# Altium footprint library Package_DFN_QFN.PcbLib: 735 footprints (part 29 of 46)
Each footprint in its own frame and in the unit in brackets; x right, y up, seen from the top. Pads: shape width x height; smd on the part's side, far side on the other; paste and mask are expansions set on the pad; w line width, h text height; cw(c..) or ccw(c..) is an arc to the next point about the centre after c.
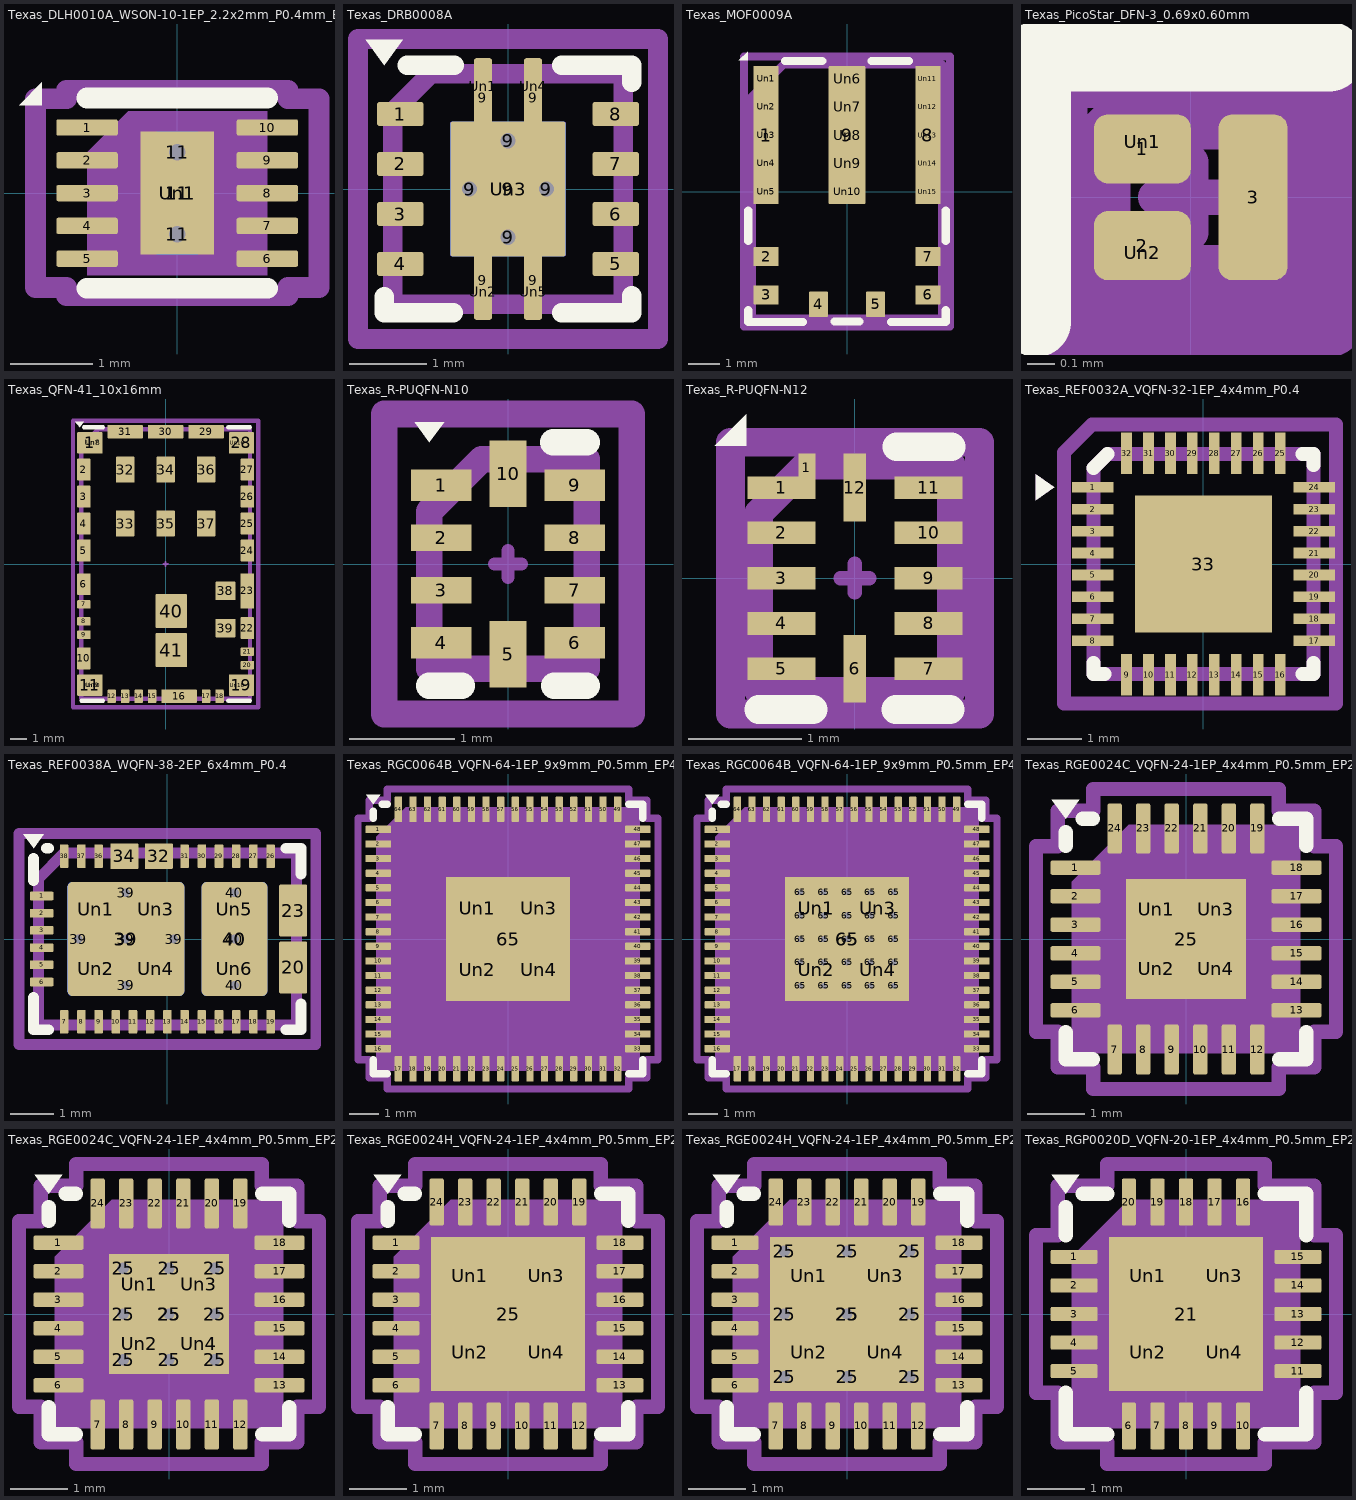
[diagram p28: the footprints below, top view; thin cyan lines are the x and y axes]

## Texas_DLH0010A_WSON-10-1EP_2.2x2mm_P0.4mm_EP0.9x1.5mm_ThermalVias [mm] "Texas_DLH0010A_WSON-10-1EP_2.2x2mm_P0.4mm_EP0.9x1.5mm_ThermalVias"
pads (15):
  rrect25% 0.75x0.2 smd: 1(-1.1,0.8) 2(-1.1,0.4) 3(-1.1,0) 4(-1.1,-0.4) 5(-1.1,-0.8) 6(1.1,-0.8) 7(1.1,-0.4) 8(1.1,0) 9(1.1,0.4) 10(1.1,0.8)
  round 0.5 hole 0.2: 11(0,-0.5) 11(0,0.5)
  rect 0.9x1.5 smd: 11(0,0)
  rect 0.5x1.5 smd far side: 11(0,0)
  rrect25% 0.84x1.41 on Top Paste: Un1(0,0)
F.SilkS:
  region: -1.65,1.07 -1.93,1.07 -1.65,1.35
  lines w0.254: -1.1,-1.16 1.1,-1.16 ; -1.1,1.16 1.1,1.16
Top Component Center:
  lines w0.127: -0.127,0 0.127,0 -0.127,0 ; 0,-0.127 0,0.127 0,-0.127
Top Assembly:
  region: 1.1,-1 -1.1,-1 -1.1,0.5 -0.6,1 1.1,1
Top Courtyard:
  lines w0.254: -1.73,-1.15 -1.73,1.15 -1.35,1.15 -1.35,1.25 1.35,1.25 1.35,1.15 1.73,1.15 1.73,-1.15 1.35,-1.15 1.35,-1.25 -1.35,-1.25 -1.35,-1.15 -1.73,-1.15
Top Designator:
  text ".Designator" at -3.43,-0.344 h1.52
3D body "Texas_DLH0010A_WSON-10-1EP_2.2x2mm_P0.4mm_EP0.9x1.5mm.step": height 0.8, standoff 0, extent -1.1,-0.988 1.1,0.988

## Texas_DRB0008A [mm] "Texas_DRB0008A"
pads (23):
  rrect16% 0.6x0.31 smd: 1(-1.4,0.975) 2(-1.4,0.325) 3(-1.4,-0.325) 4(-1.4,-0.975) 5(1.4,-0.975) 6(1.4,-0.325) 7(1.4,0.325) 8(1.4,0.975)
  round 0.5 hole 0.2: 9(-0.5,0) 9(0,-0.625) 9(0,0.625) 9(0.5,0)
  rrect22% 0.23x1.025 smd: 9(-0.325,-1.188) 9(-0.325,1.188) 9(0.325,-1.188) 9(0.325,1.188)
  rrect3% 1.5x1.75 smd: 9(0,0)
  rrect3% 1.5x1.75 smd far side: 9(0,0)
  rrect22% 0.23x0.725 on Top Paste: Un1(-0.325,1.337) Un2(-0.325,-1.337) Un4(0.325,1.337) Un5(0.325,-1.337)
  rrect4% 1.34x1.55 on Top Paste: Un3(0,0)
F.SilkS:
  region: -1.61,1.61 -1.85,1.94 -1.37,1.94
  lines w0.254: -1.61,-1.4 -1.61,-1.61 -0.71,-1.61 ; -1.31,1.61 -0.7,1.61 ; 0.7,-1.61 1.61,-1.61 1.61,-1.39 ; 0.7,1.61 1.61,1.61 1.61,1.39
Top Component Center:
  lines w0.127: -0.127,0 0.127,0 -0.127,0 ; 0,-0.127 0,0.127 0,-0.127
Top Assembly:
  lines w0.254: -1.5,-1.5 1.5,-1.5 1.5,1.5 -1,1.5 -1.5,1 -1.5,-1.5
Top Courtyard:
  lines w0.254: -1.95,-1.95 1.95,-1.95 1.95,1.95 -1.95,1.95 -1.95,-1.95
Top Designator:
  text ".Designator" at -3.43,-0.344 h1.52

## Texas_MOF0009A [mm] "Texas_MOF0009A"
pads (24):
  rrect6% 0.8x4.35 smd: 1(-2.55,1.777) 8(2.55,1.777)
  rrect8% 0.8x0.6 smd: 2(-2.55,-2.053) 3(-2.55,-3.253) 6(2.55,-3.253) 7(2.55,-2.053)
  rrect8% 0.6x0.8 smd: 4(-0.9,-3.552) 5(0.9,-3.552)
  rrect4% 1.15x4.35 smd: 9(0,1.777)
  rrect8% 0.7x0.59 on Top Paste: Un1(-2.55,3.558) Un2(-2.55,2.668) Un3(-2.55,1.777) Un4(-2.55,0.887) Un5(-2.55,-0.002) Un11(2.55,3.558) Un12(2.55,2.668) Un13(2.55,1.777) Un14(2.55,0.887) Un15(2.55,-0.002)
  rrect8% 1.05x0.59 on Top Paste: Un6(0,3.558) Un7(0,2.668) Un8(0,1.777) Un9(0,0.887) Un10(0,-0.002)
F.SilkS:
  region: -3.13,4.13 -3.41,4.13 -3.13,4.41
  lines w0.254: -3.11,-3.74 -3.11,-4.11 -1.392,-4.11 ; -3.11,-1.56 -3.11,-0.593 ; -1.955,4.11 -0.78,4.11 ; -0.4,-4.1 0.4,-4.1 ; 0.775,4.11 1.95,4.11 ; 1.392,-4.11 3.11,-4.11 3.11,-3.74 ; 3.11,-1.56 3.11,-0.593
Top Component Center:
  lines w0.127: -0.127,0 0.127,0 -0.127,0 ; 0,-0.127 0,0.127 0,-0.127
Top Assembly:
  lines w0.254: -3,-4 3,-4 3,4 -2,4 -3,3 -3,-4
Top Courtyard:
  lines w0.254: -3.25,-4.25 3.25,-4.25 3.25,4.25 -3.25,4.25 -3.25,-4.25
Top Designator:
  text ".Designator" at -3.43,-0.344 h1.52

## Texas_PicoStar_DFN-3_0.69x0.60mm [mm] "Texas_PicoStar_DFN-3_0.69x0.60mm"
pads (5):
  rrect40% 0.35x0.25 smd: 1(-0.175,0.175) 2(-0.175,-0.175)
  rrect40% 0.25x0.6 smd: 3(0.225,0)
  rrect25% 0.25x0.2 on Top Paste: Un1(-0.175,0.2) Un2(-0.175,-0.2)
F.SilkS:
  lines w0.254: -0.56,-0.45 -0.56,0.51 0.5,0.51
Top Component Center:
  lines w0.127: -0.127,0 0.127,0 -0.127,0 ; 0,-0.127 0,0.127 0,-0.127
Top Assembly:
  lines w0.254: -0.345,-0.3 0.345,-0.3 0.345,0.3 -0.195,0.3 -0.345,0.15 -0.345,-0.3
Top Courtyard:
  lines w0.254: -0.5,-0.45 0.5,-0.45 0.5,0.45 -0.5,0.45 -0.5,-0.45
Top Designator:
  text ".Designator" at -1.69,-0.17 h0.75
3D body "Texas_PicoStar_DFN-3_0.69x0.60mm.step": height 0.36, standoff 0, extent -0.345,-0.3 0.345,0.3

## Texas_QFN-41_10x16mm [mm] "Texas_QFN-41_10x16mm"
pads (65):
  rrect8% 1.5x1.27 smd: 1(-4.5,7.185) 11(-4.5,-7.185) 19(4.5,-7.185) 28(4.5,7.185)
  rrect12% 0.8x1.3 smd: 2(-4.85,5.6) 3(-4.85,4) 4(-4.85,2.4) 5(-4.85,0.8) 6(-4.85,-1.2) 10(-4.85,-5.6) 22(4.85,-3.8) 24(4.85,0.8) 25(4.85,2.4) 26(4.85,4) 27(4.85,5.6)
  rrect20% 0.8x0.5 smd: 7(-4.85,-2.4) 8(-4.85,-3.4) 9(-4.85,-4.2) 20(4.85,-6) 21(4.85,-5.2)
  rrect20% 0.5x0.8 smd: 12(-3.2,-7.85) 13(-2.4,-7.85) 14(-1.6,-7.85) 15(-0.8,-7.85) 17(2.4,-7.85) 18(3.2,-7.85)
  rrect12% 2.1x0.8 smd: 16(0.8,-7.85) 29(2.4,7.85) 30(0,7.85) 31(-2.4,7.85)
  rrect12% 0.8x2.1 smd: 23(4.85,-1.6)
  rrect9% 1.1x1.54 smd: 32(-2.4,5.6) 33(-2.4,2.4) 34(0,5.6) 35(0,2.4) 36(2.4,5.6) 37(2.4,2.4)
  rrect9% 1.2x1.1 smd: 38(3.55,-1.6) 39(3.55,-3.8)
  rrect5% 1.85x2.02 smd: 40(0.335,-2.79) 41(0.335,-5.11)
  rect 0.27x0.6 on Top Solder: Un1(-4.635,5.6) Un2(-4.635,4) Un3(-4.635,2.4) Un4(-4.635,0.8) Un5(-4.635,-1.2) Un6(-4.635,-5.6) Un19(4.635,5.6) Un20(4.635,4) Un21(4.635,2.4) Un22(4.635,0.8) Un24(4.635,-3.8)
  rect 0.87x0.87 on Top Paste: Un7(-4.285,7.185) Un9(-4.285,-7.185) Un15(4.285,7.185) Un17(4.285,-7.185)
  rect 0.87x1.07 on Top Solder: Un8(-4.285,7.185) Un10(-4.285,-7.185) Un16(4.285,7.185) Un18(4.285,-7.185)
  rect 1.6x0.27 on Top Solder: Un11(-2.4,7.635) Un12(0,7.635) Un13(0.8,-7.635) Un14(2.4,7.635)
  rect 0.27x1.6 on Top Solder: Un23(4.635,-1.6)
F.SilkS:
  region: -5.11,8.11 -5.35,8.44 -4.87,8.44
  lines w0.254: -4.99,-8.11 -3.71,-8.11 ; -4.84,8.11 -3.72,8.11 ; 3.71,8.11 5,8.11 ; 3.72,-8.11 5,-8.11
F.Paste:
  drawing of 41 lines, arcs and shapes, not listed
F.Mask:
  drawing of 41 lines, arcs and shapes, not listed
Top Component Center:
  lines w0.127: -0.127,0 0.127,0 -0.127,0 ; 0,-0.127 0,0.127 0,-0.127
Top Assembly:
  lines w0.254: -5,-8 5,-8 5,8 -4,8 -5,7 -5,-8
Top Courtyard:
  lines w0.254: -5.5,-8.5 5.5,-8.5 5.5,8.5 -5.5,8.5 -5.5,-8.5
Top Designator:
  text ".Designator" at -3.43,-0.344 h1.52

## Texas_R-PUQFN-N10 [mm] "Texas_R-PUQFN-N10"
pads (10):
  rect 0.575x0.3 smd: 1(-0.637,0.75) 4(-0.637,-0.75) 6(0.637,-0.75) 9(0.637,0.75)
  rect 0.575x0.25 smd: 2(-0.637,0.25) 3(-0.637,-0.25) 7(0.637,-0.25) 8(0.637,0.25)
  rect 0.35x0.63 smd: 5(0,-0.86) 10(0,0.86)
F.SilkS:
  region: -0.75,1.16 -0.89,1.35 -0.61,1.35
  lines w0.254: -0.75,-1.16 -0.44,-1.16 ; 0.43,1.16 0.75,1.16 ; 0.44,-1.16 0.75,-1.16
Top Component Center:
  lines w0.127: -0.127,0 0.127,0 -0.127,0 ; 0,-0.127 0,0.127 0,-0.127
Top Assembly:
  lines w0.254: -0.75,-1 -0.75,0.5 -0.25,1 0.75,1 0.75,-1 -0.75,-1
Top Courtyard:
  lines w0.254: -1.18,-1.43 -1.18,1.43 1.18,1.43 1.18,-1.43 -1.18,-1.43
Top Designator:
  text ".Designator" at -1.575,-0.158 h0.7

## Texas_R-PUQFN-N12 [mm] "Texas_R-PUQFN-N12"
pads (13):
  rect 0.6x0.2 smd: 1(-0.65,0.8) 2(-0.65,0.4) 3(-0.65,0) 4(-0.65,-0.4) 5(-0.65,-0.8) 7(0.65,-0.8) 8(0.65,-0.4) 9(0.65,0) 10(0.65,0.4) 11(0.65,0.8)
  rect 0.15x0.25 smd: 1(-0.425,0.975)
  rect 0.2x0.6 smd: 6(0,-0.8) 12(0,0.8)
F.SilkS:
  region: -0.96,1.17 -1.24,1.17 -0.96,1.45
  lines w0.254: -0.85,-1.16 -0.37,-1.16 ; 0.36,-1.16 0.84,-1.16 ; 0.37,1.16 0.85,1.16
Top Component Center:
  lines w0.127: -0.127,0 0.127,0 -0.127,0 ; 0,-0.127 0,0.127 0,-0.127
Top Assembly:
  lines w0.254: -0.85,-1 0.85,-1 0.85,1 -0.425,1 -0.85,0.575 -0.85,-1
Top Courtyard:
  lines w0.254: -1.1,-1.2 1.1,-1.2 1.1,1.2 -1.1,1.2 -1.1,-1.2
Top Designator:
  text ".Designator" at -1.575,-0.158 h0.7
3D body "Texas_R-PUQFN-N12.step": height 0.53, standoff 0, extent -0.85,-1 0.85,1

## Texas_REF0032A_VQFN-32-1EP_4x4mm_P0.4 [mm] "Texas_REF0038A_WQFN-38-2EP_6x4mm_P0.4"
pads (33):
  rect 0.75x0.192 smd: 1(-2.016,1.4) 2(-2.016,1) 3(-2.016,0.6) 4(-2.016,0.2) 5(-2.016,-0.2) 6(-2.016,-0.6) 7(-2.016,-1) 8(-2.016,-1.4) 17(2.016,-1.4) 18(2.016,-1) 19(2.016,-0.6) 20(2.016,-0.2) 21(2.016,0.2) 22(2.016,0.6) 23(2.016,1) 24(2.016,1.4)
  rect 0.192x0.75 smd: 9(-1.4,-2.016) 10(-1,-2.016) 11(-0.6,-2.016) 12(-0.2,-2.016) 13(0.2,-2.016) 14(0.6,-2.016) 15(1,-2.016) 16(1.4,-2.016) 25(1.4,2.016) 26(1,2.016) 27(0.6,2.016) 28(0.2,2.016) 29(-0.2,2.016) 30(-0.6,2.016) 31(-1,2.016) 32(-1.4,2.016)
  rect 2.5x2.5 smd: 33(0,0)
F.SilkS:
  region: -2.718,1.397 -3.048,1.157 -3.048,1.637
  lines w0.254: -2,-1.8 -2,-2 -1.8,-2 ; -2,1.75 -1.75,2 ; 1.8,-2 2,-2 2,-1.8 ; 1.8,2 2,2 2,1.8
F.Paste:
  region: 0.901,-0.901 -0.901,-0.901 -0.901,0.901 0.901,0.901
Top Assembly:
  region: -2.718,1.397 -3.048,1.157 -3.048,1.637
  lines w0.254: -2,-2 2,-2 2,2 -1.75,2 -2,1.75 -2,-2
  text "'.Designator'" at -4.047,-0.84 h1
Top Courtyard:
  lines w0.254: -2.54,-2.54 2.413,-2.54 2.413,2.54 -2.032,2.54 -2.54,2.032 -2.54,-2.54
3D body "Texas_REF0032A_VQFN-32-1EP_4x4mm_P0.4.stp": height 1, standoff 0, extent -2,-2 2,2

## Texas_REF0038A_WQFN-38-2EP_6x4mm_P0.4 [mm] "Texas_REF0038A_WQFN-38-2EP_6x4mm_P0.4"
pads (50):
  rrect25% 0.55x0.2 smd: 1(-2.925,1) 2(-2.925,0.6) 3(-2.925,0.2) 4(-2.925,-0.2) 5(-2.925,-0.6) 6(-2.925,-1)
  rrect25% 0.2x0.55 smd: 7(-2.4,-1.925) 8(-2,-1.925) 9(-1.6,-1.925) 10(-1.2,-1.925) 11(-0.8,-1.925) 12(-0.4,-1.925) 13(0,-1.925) 14(0.4,-1.925) 15(0.8,-1.925) 16(1.2,-1.925) 17(1.6,-1.925) 18(2,-1.925) 19(2.4,-1.925) 26(2.4,1.925) 27(2,1.925) 28(1.6,1.925) 29(1.2,1.925) 30(0.8,1.925) 31(0.4,1.925) 36(-1.6,1.925) 37(-2,1.925) 38(-2.4,1.925)
  rrect8% 0.65x1.2 smd: 20(2.925,-0.663) 23(2.925,0.663)
  rrect8% 0.65x0.6 smd: 32(-0.2,1.925) 34(-1,1.925)
  round 0.5 hole 0.2: 39(-2.075,0) 39(-0.965,-1.075) 39(-0.965,0) 39(-0.965,1.075) 39(0.145,0) 40(1.56,-1.075) 40(1.56,0) 40(1.56,1.075)
  rrect9% 2.72x2.65 smd: 39(-0.965,0)
  rrect9% 2.72x2.65 smd far side: 39(-0.965,0)
  rrect16% 1.53x2.65 smd: 40(1.56,0)
  rrect16% 1.53x2.65 smd far side: 40(1.56,0)
  rrect21% 1.17x1.17 on Top Paste: Un1(-1.66,0.69) Un3(-0.27,0.69)
  rrect21% 1.19x1.17 on Top Paste: Un2(-1.66,-0.69) Un4(-0.27,-0.69)
  rrect21% 1.4x1.17 on Top Paste: Un5(1.56,0.69) Un6(1.56,-0.69)
F.SilkS:
  region: -3.11,2.11 -3.35,2.44 -2.87,2.44
  lines w0.254: -3.11,-1.36 -3.11,-2.11 -2.76,-2.11 ; -3.11,1.36 -3.11,1.87 ; -2.81,2.11 -2.76,2.11 ; 2.76,-2.11 3.11,-2.11 3.11,-1.51 ; 2.76,2.11 3.11,2.11 3.11,1.51
F.Paste:
  region: -0.75,1.7 -1.25,1.7 -1.25,2.15 -1.15,2.15 -1.15,1.8 -0.85,1.8 -0.85,2.15 -0.75,2.15
  region: 0.05,1.7 -0.45,1.7 -0.45,2.15 -0.35,2.15 -0.35,1.8 -0.05,1.8 -0.05,2.15 0.05,2.15
  region: 3.15,1.062 2.8,1.062 2.8,0.713 3.15,0.713 3.15,0.613 2.8,0.613 2.8,0.262 3.15,0.262 3.15,0.162 2.7,0.162 2.7,1.162 3.15,1.162
  region: 3.15,-0.262 2.8,-0.262 2.8,-0.613 3.15,-0.613 3.15,-0.713 2.8,-0.713 2.8,-1.062 3.15,-1.062 3.15,-1.162 2.7,-1.162 2.7,-0.162 3.15,-0.162
F.Mask:
  region: -0.75,1.7 -1.25,1.7 -1.25,2.15 -1.15,2.15 -1.15,1.8 -0.85,1.8 -0.85,2.15 -0.75,2.15
  region: 0.05,1.7 -0.45,1.7 -0.45,2.15 -0.35,2.15 -0.35,1.8 -0.05,1.8 -0.05,2.15 0.05,2.15
  region: 3.15,1.062 2.8,1.062 2.8,0.713 3.15,0.713 3.15,0.613 2.8,0.613 2.8,0.262 3.15,0.262 3.15,0.162 2.7,0.162 2.7,1.162 3.15,1.162
  region: 3.15,-0.262 2.8,-0.262 2.8,-0.613 3.15,-0.613 3.15,-0.713 2.8,-0.713 2.8,-1.062 3.15,-1.062 3.15,-1.162 2.7,-1.162 2.7,-0.162 3.15,-0.162
Top Component Center:
  lines w0.127: -0.127,0 0.127,0 -0.127,0 ; 0,-0.127 0,0.127 0,-0.127
Top Assembly:
  lines w0.254: -3,-2 -3,1.4 -2.4,2 3,2 3,-2 -3,-2
Top Courtyard:
  lines w0.254: -3.45,-2.45 -3.45,2.45 3.45,2.45 3.45,-2.45 -3.45,-2.45
Top Designator:
  text ".Designator" at -3.43,-0.344 h1.52
3D body "Texas_REF0038A_WQFN-38-2EP_6x4mm_P0.4.stp": height 0.8, standoff 0, extent -2.996,-1.988 3.004,2.012

## Texas_RGC0064B_VQFN-64-1EP_9x9mm_P0.5mm_EP4.25x4.25mm [mm] "Texas_RGC0064B_VQFN-64-1EP_9x9mm_P0.5mm_EP4.25x4.25mm"
pads (69):
  rrect25% 0.875x0.25 smd: 1(-4.437,3.75) 2(-4.437,3.25) 3(-4.437,2.75) 4(-4.437,2.25) 5(-4.437,1.75) 6(-4.437,1.25) 7(-4.437,0.75) 8(-4.437,0.25) 9(-4.437,-0.25) 10(-4.437,-0.75) 11(-4.437,-1.25) 12(-4.437,-1.75) 13(-4.437,-2.25) 14(-4.437,-2.75) 15(-4.437,-3.25) 16(-4.437,-3.75) 33(4.437,-3.75) 34(4.437,-3.25) 35(4.437,-2.75) 36(4.437,-2.25) 37(4.437,-1.75) 38(4.437,-1.25) 39(4.437,-0.75) 40(4.437,-0.25) 41(4.437,0.25) 42(4.437,0.75) 43(4.437,1.25) 44(4.437,1.75) 45(4.437,2.25) 46(4.437,2.75) 47(4.437,3.25) 48(4.437,3.75)
  rrect25% 0.25x0.875 smd: 17(-3.75,-4.437) 18(-3.25,-4.437) 19(-2.75,-4.437) 20(-2.25,-4.437) 21(-1.75,-4.437) 22(-1.25,-4.437) 23(-0.75,-4.437) 24(-0.25,-4.437) 25(0.25,-4.437) 26(0.75,-4.437) 27(1.25,-4.437) 28(1.75,-4.437) 29(2.25,-4.437) 30(2.75,-4.437) 31(3.25,-4.437) 32(3.75,-4.437) 49(3.75,4.437) 50(3.25,4.437) 51(2.75,4.437) 52(2.25,4.437) 53(1.75,4.437) 54(1.25,4.437) 55(0.75,4.437) 56(0.25,4.437) 57(-0.25,4.437) 58(-0.75,4.437) 59(-1.25,4.437) 60(-1.75,4.437) 61(-2.25,4.437) 62(-2.75,4.437) 63(-3.25,4.437) 64(-3.75,4.437)
  rect 4.25x4.25 smd: 65(0,0)
  rrect15% 1.71x1.71 on Top Paste: Un1(-1.06,1.06) Un2(-1.06,-1.06) Un3(1.06,1.06) Un4(1.06,-1.06)
F.SilkS:
  region: -4.61,4.61 -4.85,4.94 -4.37,4.94
  lines w0.254: -4.61,-4.135 -4.61,-4.61 -4.135,-4.61 ; -4.61,4.135 -4.61,4.37 ; -4.31,4.61 -4.135,4.61 ; 4.135,-4.61 4.61,-4.61 4.61,-4.135 ; 4.135,4.61 4.61,4.61 4.61,4.135
Top Component Center:
  lines w0.127: -0.127,0 0.127,0 -0.127,0 ; 0,-0.127 0,0.127 0,-0.127
Top Assembly:
  region: 4.5,-4.5 -4.5,-4.5 -4.5,3.5 -3.5,4.5 4.5,4.5
Top Courtyard:
  lines w0.254: -5.13,-4.13 -4.75,-4.13 -4.75,-4.75 -4.13,-4.75 -4.13,-5.13 4.13,-5.13 4.13,-4.75 4.75,-4.75 4.75,-4.13 5.13,-4.13 5.13,4.13 4.75,4.13 4.75,4.75 4.13,4.75 4.13,5.13 -4.13,5.13 -4.13,4.75 -4.75,4.75 -4.75,4.13 -5.13,4.13 -5.13,-4.13
Top Designator:
  text ".Designator" at -3.43,-0.344 h1.52
3D body "Texas_RGC0064B_VQFN-64-1EP_9x9mm_P0.5mm_EP4.25x4.25mm.step": height 0.8, standoff 0, extent -4.5,-4.5 4.5,4.5

## Texas_RGC0064B_VQFN-64-1EP_9x9mm_P0.5mm_EP4.25x4.25mm_ThermalVias [mm] "Texas_RGC0064B_VQFN-64-1EP_9x9mm_P0.5mm_EP4.25x4.25mm_ThermalVias"
pads (95):
  rrect25% 0.875x0.25 smd: 1(-4.437,3.75) 2(-4.437,3.25) 3(-4.437,2.75) 4(-4.437,2.25) 5(-4.437,1.75) 6(-4.437,1.25) 7(-4.437,0.75) 8(-4.437,0.25) 9(-4.437,-0.25) 10(-4.437,-0.75) 11(-4.437,-1.25) 12(-4.437,-1.75) 13(-4.437,-2.25) 14(-4.437,-2.75) 15(-4.437,-3.25) 16(-4.437,-3.75) 33(4.437,-3.75) 34(4.437,-3.25) 35(4.437,-2.75) 36(4.437,-2.25) 37(4.437,-1.75) 38(4.437,-1.25) 39(4.437,-0.75) 40(4.437,-0.25) 41(4.437,0.25) 42(4.437,0.75) 43(4.437,1.25) 44(4.437,1.75) 45(4.437,2.25) 46(4.437,2.75) 47(4.437,3.25) 48(4.437,3.75)
  rrect25% 0.25x0.875 smd: 17(-3.75,-4.437) 18(-3.25,-4.437) 19(-2.75,-4.437) 20(-2.25,-4.437) 21(-1.75,-4.437) 22(-1.25,-4.437) 23(-0.75,-4.437) 24(-0.25,-4.437) 25(0.25,-4.437) 26(0.75,-4.437) 27(1.25,-4.437) 28(1.75,-4.437) 29(2.25,-4.437) 30(2.75,-4.437) 31(3.25,-4.437) 32(3.75,-4.437) 49(3.75,4.437) 50(3.25,4.437) 51(2.75,4.437) 52(2.25,4.437) 53(1.75,4.437) 54(1.25,4.437) 55(0.75,4.437) 56(0.25,4.437) 57(-0.25,4.437) 58(-0.75,4.437) 59(-1.25,4.437) 60(-1.75,4.437) 61(-2.25,4.437) 62(-2.75,4.437) 63(-3.25,4.437) 64(-3.75,4.437)
  round 0.5 hole 0.2: 65(-1.6,-1.6) 65(-1.6,-0.8) 65(-1.6,0) 65(-1.6,0.8) 65(-1.6,1.6) 65(-0.8,-1.6) 65(-0.8,-0.8) 65(-0.8,0) 65(-0.8,0.8) 65(-0.8,1.6) 65(0,-1.6) 65(0,-0.8) 65(0,0) 65(0,0.8) 65(0,1.6) 65(0.8,-1.6) 65(0.8,-0.8) 65(0.8,0) 65(0.8,0.8) 65(0.8,1.6) 65(1.6,-1.6) 65(1.6,-0.8) 65(1.6,0) 65(1.6,0.8) 65(1.6,1.6)
  rect 4.25x4.25 smd: 65(0,0)
  rect 3.7x3.7 smd far side: 65(0,0)
  rrect15% 1.71x1.71 on Top Paste: Un1(-1.06,1.06) Un2(-1.06,-1.06) Un3(1.06,1.06) Un4(1.06,-1.06)
F.SilkS:
  region: -4.61,4.61 -4.85,4.94 -4.37,4.94
  lines w0.254: -4.61,-4.135 -4.61,-4.61 -4.135,-4.61 ; -4.61,4.135 -4.61,4.37 ; -4.31,4.61 -4.135,4.61 ; 4.135,-4.61 4.61,-4.61 4.61,-4.135 ; 4.135,4.61 4.61,4.61 4.61,4.135
Top Component Center:
  lines w0.127: -0.127,0 0.127,0 -0.127,0 ; 0,-0.127 0,0.127 0,-0.127
Top Assembly:
  region: 4.5,-4.5 -4.5,-4.5 -4.5,3.5 -3.5,4.5 4.5,4.5
Top Courtyard:
  lines w0.254: -5.13,-4.13 -5.13,4.13 -4.75,4.13 -4.75,4.75 -4.13,4.75 -4.13,5.13 4.13,5.13 4.13,4.75 4.75,4.75 4.75,4.13 5.13,4.13 5.13,-4.13 4.75,-4.13 4.75,-4.75 4.13,-4.75 4.13,-5.13 -4.13,-5.13 -4.13,-4.75 -4.75,-4.75 -4.75,-4.13 -5.13,-4.13
Top Designator:
  text ".Designator" at -3.43,-0.344 h1.52
3D body "Texas_RGC0064B_VQFN-64-1EP_9x9mm_P0.5mm_EP4.25x4.25mm.step": height 0.8, standoff 0, extent -4.5,-4.5 4.5,4.5

## Texas_RGE0024C_VQFN-24-1EP_4x4mm_P0.5mm_EP2.1x2.1mm [mm] "Texas_RGE0024C_VQFN-24-1EP_4x4mm_P0.5mm_EP2.1x2.1mm"
pads (29):
  rrect25% 0.875x0.25 smd: 1(-1.937,1.25) 2(-1.937,0.75) 3(-1.937,0.25) 4(-1.937,-0.25) 5(-1.937,-0.75) 6(-1.937,-1.25) 13(1.937,-1.25) 14(1.937,-0.75) 15(1.937,-0.25) 16(1.937,0.25) 17(1.937,0.75) 18(1.937,1.25)
  rrect25% 0.25x0.875 smd: 7(-1.25,-1.937) 8(-0.75,-1.937) 9(-0.25,-1.937) 10(0.25,-1.937) 11(0.75,-1.937) 12(1.25,-1.937) 19(1.25,1.937) 20(0.75,1.937) 21(0.25,1.937) 22(-0.25,1.937) 23(-0.75,1.937) 24(-1.25,1.937)
  rect 2.1x2.1 smd: 25(0,0)
  rrect25% 0.85x0.85 on Top Paste: Un1(-0.525,0.525) Un2(-0.525,-0.525) Un3(0.525,0.525) Un4(0.525,-0.525)
F.SilkS:
  region: -2.11,2.11 -2.35,2.44 -1.87,2.44
  lines w0.254: -2.11,-1.635 -2.11,-2.11 -1.635,-2.11 ; -2.11,1.635 -2.11,1.87 ; -1.81,2.11 -1.635,2.11 ; 1.635,-2.11 2.11,-2.11 2.11,-1.635 ; 1.635,2.11 2.11,2.11 2.11,1.635
Top Component Center:
  lines w0.127: -0.127,0 0.127,0 -0.127,0 ; 0,-0.127 0,0.127 0,-0.127
Top Assembly:
  region: 2,-2 -2,-2 -2,1 -1,2 2,2
Top Courtyard:
  lines w0.254: -2.63,-1.63 -2.63,1.63 -2.25,1.63 -2.25,2.25 -1.63,2.25 -1.63,2.63 1.63,2.63 1.63,2.25 2.25,2.25 2.25,1.63 2.63,1.63 2.63,-1.63 2.25,-1.63 2.25,-2.25 1.63,-2.25 1.63,-2.63 -1.63,-2.63 -1.63,-2.25 -2.25,-2.25 -2.25,-1.63 -2.63,-1.63
Top Designator:
  text ".Designator" at -3.43,-0.344 h1.52
3D body "Texas_RGE0024C_VQFN-24-1EP_4x4mm_P0.5mm_EP2.1x2.1mm.step": height 0.8, standoff 0, extent -2,-2 2,2

## Texas_RGE0024C_VQFN-24-1EP_4x4mm_P0.5mm_EP2.1x2.1mm_ThermalVias [mm] "Texas_RGE0024C_VQFN-24-1EP_4x4mm_P0.5mm_EP2.1x2.1mm_ThermalVias"
pads (39):
  rrect25% 0.875x0.25 smd: 1(-1.937,1.25) 2(-1.937,0.75) 3(-1.937,0.25) 4(-1.937,-0.25) 5(-1.937,-0.75) 6(-1.937,-1.25) 13(1.937,-1.25) 14(1.937,-0.75) 15(1.937,-0.25) 16(1.937,0.25) 17(1.937,0.75) 18(1.937,1.25)
  rrect25% 0.25x0.875 smd: 7(-1.25,-1.937) 8(-0.75,-1.937) 9(-0.25,-1.937) 10(0.25,-1.937) 11(0.75,-1.937) 12(1.25,-1.937) 19(1.25,1.937) 20(0.75,1.937) 21(0.25,1.937) 22(-0.25,1.937) 23(-0.75,1.937) 24(-1.25,1.937)
  round 0.5 hole 0.2: 25(-0.8,-0.8) 25(-0.8,0) 25(-0.8,0.8) 25(0,-0.8) 25(0,0) 25(0,0.8) 25(0.8,-0.8) 25(0.8,0) 25(0.8,0.8)
  rect 2.1x2.1 smd: 25(0,0)
  rect 2.1x2.1 smd far side: 25(0,0)
  rrect25% 0.85x0.85 on Top Paste: Un1(-0.525,0.525) Un2(-0.525,-0.525) Un3(0.525,0.525) Un4(0.525,-0.525)
F.SilkS:
  region: -2.11,2.11 -2.35,2.44 -1.87,2.44
  lines w0.254: -2.11,-1.635 -2.11,-2.11 -1.635,-2.11 ; -2.11,1.635 -2.11,1.87 ; -1.81,2.11 -1.635,2.11 ; 1.635,-2.11 2.11,-2.11 2.11,-1.635 ; 1.635,2.11 2.11,2.11 2.11,1.635
Top Component Center:
  lines w0.127: -0.127,0 0.127,0 -0.127,0 ; 0,-0.127 0,0.127 0,-0.127
Top Assembly:
  region: 2,-2 -2,-2 -2,1 -1,2 2,2
Top Courtyard:
  lines w0.254: -2.63,-1.63 -2.25,-1.63 -2.25,-2.25 -1.63,-2.25 -1.63,-2.63 1.63,-2.63 1.63,-2.25 2.25,-2.25 2.25,-1.63 2.63,-1.63 2.63,1.63 2.25,1.63 2.25,2.25 1.63,2.25 1.63,2.63 -1.63,2.63 -1.63,2.25 -2.25,2.25 -2.25,1.63 -2.63,1.63 -2.63,-1.63
Top Designator:
  text ".Designator" at -3.43,-0.344 h1.52
3D body "Texas_RGE0024C_VQFN-24-1EP_4x4mm_P0.5mm_EP2.1x2.1mm.step": height 0.8, standoff 0, extent -2,-2 2,2

## Texas_RGE0024H_VQFN-24-1EP_4x4mm_P0.5mm_EP2.7x2.7mm [mm] "Texas_RGE0024H_VQFN-24-1EP_4x4mm_P0.5mm_EP2.7x2.7mm"
pads (29):
  rrect25% 0.825x0.25 smd: 1(-1.963,1.25) 2(-1.963,0.75) 3(-1.963,0.25) 4(-1.963,-0.25) 5(-1.963,-0.75) 6(-1.963,-1.25) 13(1.963,-1.25) 14(1.963,-0.75) 15(1.963,-0.25) 16(1.963,0.25) 17(1.963,0.75) 18(1.963,1.25)
  rrect25% 0.25x0.825 smd: 7(-1.25,-1.963) 8(-0.75,-1.963) 9(-0.25,-1.963) 10(0.25,-1.963) 11(0.75,-1.963) 12(1.25,-1.963) 19(1.25,1.963) 20(0.75,1.963) 21(0.25,1.963) 22(-0.25,1.963) 23(-0.75,1.963) 24(-1.25,1.963)
  rect 2.7x2.7 smd: 25(0,0)
  rrect23% 1.09x1.09 on Top Paste: Un1(-0.675,0.675) Un2(-0.675,-0.675) Un3(0.675,0.675) Un4(0.675,-0.675)
F.SilkS:
  region: -2.11,2.11 -2.35,2.44 -1.87,2.44
  lines w0.254: -2.11,-1.635 -2.11,-2.11 -1.635,-2.11 ; -2.11,1.635 -2.11,1.87 ; -1.81,2.11 -1.635,2.11 ; 1.635,-2.11 2.11,-2.11 2.11,-1.635 ; 1.635,2.11 2.11,2.11 2.11,1.635
Top Component Center:
  lines w0.127: -0.127,0 0.127,0 -0.127,0 ; 0,-0.127 0,0.127 0,-0.127
Top Assembly:
  region: 2,-2 -2,-2 -2,1 -1,2 2,2
Top Courtyard:
  lines w0.254: -2.63,-1.63 -2.63,1.63 -2.25,1.63 -2.25,2.25 -1.63,2.25 -1.63,2.63 1.63,2.63 1.63,2.25 2.25,2.25 2.25,1.63 2.63,1.63 2.63,-1.63 2.25,-1.63 2.25,-2.25 1.63,-2.25 1.63,-2.63 -1.63,-2.63 -1.63,-2.25 -2.25,-2.25 -2.25,-1.63 -2.63,-1.63
Top Designator:
  text ".Designator" at -3.43,-0.344 h1.52
3D body "Texas_RGE0024H_VQFN-24-1EP_4x4mm_P0.5mm_EP2.7x2.7mm.step": height 0.8, standoff 0, extent -2,-2 2,2

## Texas_RGE0024H_VQFN-24-1EP_4x4mm_P0.5mm_EP2.7x2.7mm_ThermalVias [mm] "Texas_RGE0024H_VQFN-24-1EP_4x4mm_P0.5mm_EP2.7x2.7mm_ThermalVias"
pads (39):
  rrect25% 0.825x0.25 smd: 1(-1.963,1.25) 2(-1.963,0.75) 3(-1.963,0.25) 4(-1.963,-0.25) 5(-1.963,-0.75) 6(-1.963,-1.25) 13(1.963,-1.25) 14(1.963,-0.75) 15(1.963,-0.25) 16(1.963,0.25) 17(1.963,0.75) 18(1.963,1.25)
  rrect25% 0.25x0.825 smd: 7(-1.25,-1.963) 8(-0.75,-1.963) 9(-0.25,-1.963) 10(0.25,-1.963) 11(0.75,-1.963) 12(1.25,-1.963) 19(1.25,1.963) 20(0.75,1.963) 21(0.25,1.963) 22(-0.25,1.963) 23(-0.75,1.963) 24(-1.25,1.963)
  round 0.5 hole 0.2: 25(-1.1,-1.1) 25(-1.1,0) 25(-1.1,1.1) 25(0,-1.1) 25(0,0) 25(0,1.1) 25(1.1,-1.1) 25(1.1,0) 25(1.1,1.1)
  rect 2.7x2.7 smd: 25(0,0)
  rect 2.7x2.7 smd far side: 25(0,0)
  rrect21% 1.17x1.17 on Top Paste: Un1(-0.675,0.675) Un2(-0.675,-0.675) Un3(0.675,0.675) Un4(0.675,-0.675)
F.SilkS:
  region: -2.11,2.11 -2.35,2.44 -1.87,2.44
  lines w0.254: -2.11,-1.635 -2.11,-2.11 -1.635,-2.11 ; -2.11,1.635 -2.11,1.87 ; -1.81,2.11 -1.635,2.11 ; 1.635,-2.11 2.11,-2.11 2.11,-1.635 ; 1.635,2.11 2.11,2.11 2.11,1.635
Top Component Center:
  lines w0.127: -0.127,0 0.127,0 -0.127,0 ; 0,-0.127 0,0.127 0,-0.127
Top Assembly:
  region: 2,-2 -2,-2 -2,1 -1,2 2,2
Top Courtyard:
  lines w0.254: -2.63,-1.63 -2.25,-1.63 -2.25,-2.25 -1.63,-2.25 -1.63,-2.63 1.63,-2.63 1.63,-2.25 2.25,-2.25 2.25,-1.63 2.63,-1.63 2.63,1.63 2.25,1.63 2.25,2.25 1.63,2.25 1.63,2.63 -1.63,2.63 -1.63,2.25 -2.25,2.25 -2.25,1.63 -2.63,1.63 -2.63,-1.63
Top Designator:
  text ".Designator" at -3.43,-0.344 h1.52
3D body "Texas_RGE0024H_VQFN-24-1EP_4x4mm_P0.5mm_EP2.7x2.7mm.step": height 0.8, standoff 0, extent -2,-2 2,2

## Texas_RGP0020D_VQFN-20-1EP_4x4mm_P0.5mm_EP2.7x2.7mm [mm] "Texas_RGP0020D_VQFN-20-1EP_4x4mm_P0.5mm_EP2.7x2.7mm"
pads (25):
  rrect25% 0.825x0.25 smd: 1(-1.963,1) 2(-1.963,0.5) 3(-1.963,0) 4(-1.963,-0.5) 5(-1.963,-1) 11(1.963,-1) 12(1.963,-0.5) 13(1.963,0) 14(1.963,0.5) 15(1.963,1)
  rrect25% 0.25x0.825 smd: 6(-1,-1.963) 7(-0.5,-1.963) 8(0,-1.963) 9(0.5,-1.963) 10(1,-1.963) 16(1,1.963) 17(0.5,1.963) 18(0,1.963) 19(-0.5,1.963) 20(-1,1.963)
  rect 2.7x2.7 smd: 21(0,0)
  rrect23% 1.09x1.09 on Top Paste: Un1(-0.675,0.675) Un2(-0.675,-0.675) Un3(0.675,0.675) Un4(0.675,-0.675)
F.SilkS:
  region: -2.11,2.11 -2.35,2.44 -1.87,2.44
  lines w0.254: -2.11,-1.385 -2.11,-2.11 -1.385,-2.11 ; -2.11,1.385 -2.11,1.87 ; -1.81,2.11 -1.385,2.11 ; 1.385,-2.11 2.11,-2.11 2.11,-1.385 ; 1.385,2.11 2.11,2.11 2.11,1.385
Top Component Center:
  lines w0.127: -0.127,0 0.127,0 -0.127,0 ; 0,-0.127 0,0.127 0,-0.127
Top Assembly:
  region: 2,-2 -2,-2 -2,1 -1,2 2,2
Top Courtyard:
  lines w0.254: -2.63,-1.38 -2.25,-1.38 -2.25,-2.25 -1.38,-2.25 -1.38,-2.63 1.38,-2.63 1.38,-2.25 2.25,-2.25 2.25,-1.38 2.63,-1.38 2.63,1.38 2.25,1.38 2.25,2.25 1.38,2.25 1.38,2.63 -1.38,2.63 -1.38,2.25 -2.25,2.25 -2.25,1.38 -2.63,1.38 -2.63,-1.38
Top Designator:
  text ".Designator" at -3.43,-0.344 h1.52